# Altium footprint library Robot.PcbLib: 113 footprints (part 3 of 8)
Each footprint in its own frame and in the unit in brackets; x right, y up, seen from the top. Pads: shape width x height; smd on the part's side, far side on the other; paste and mask are expansions set on the pad; w line width, h text height; cw(c..) or ccw(c..) is an arc to the next point about the centre after c.
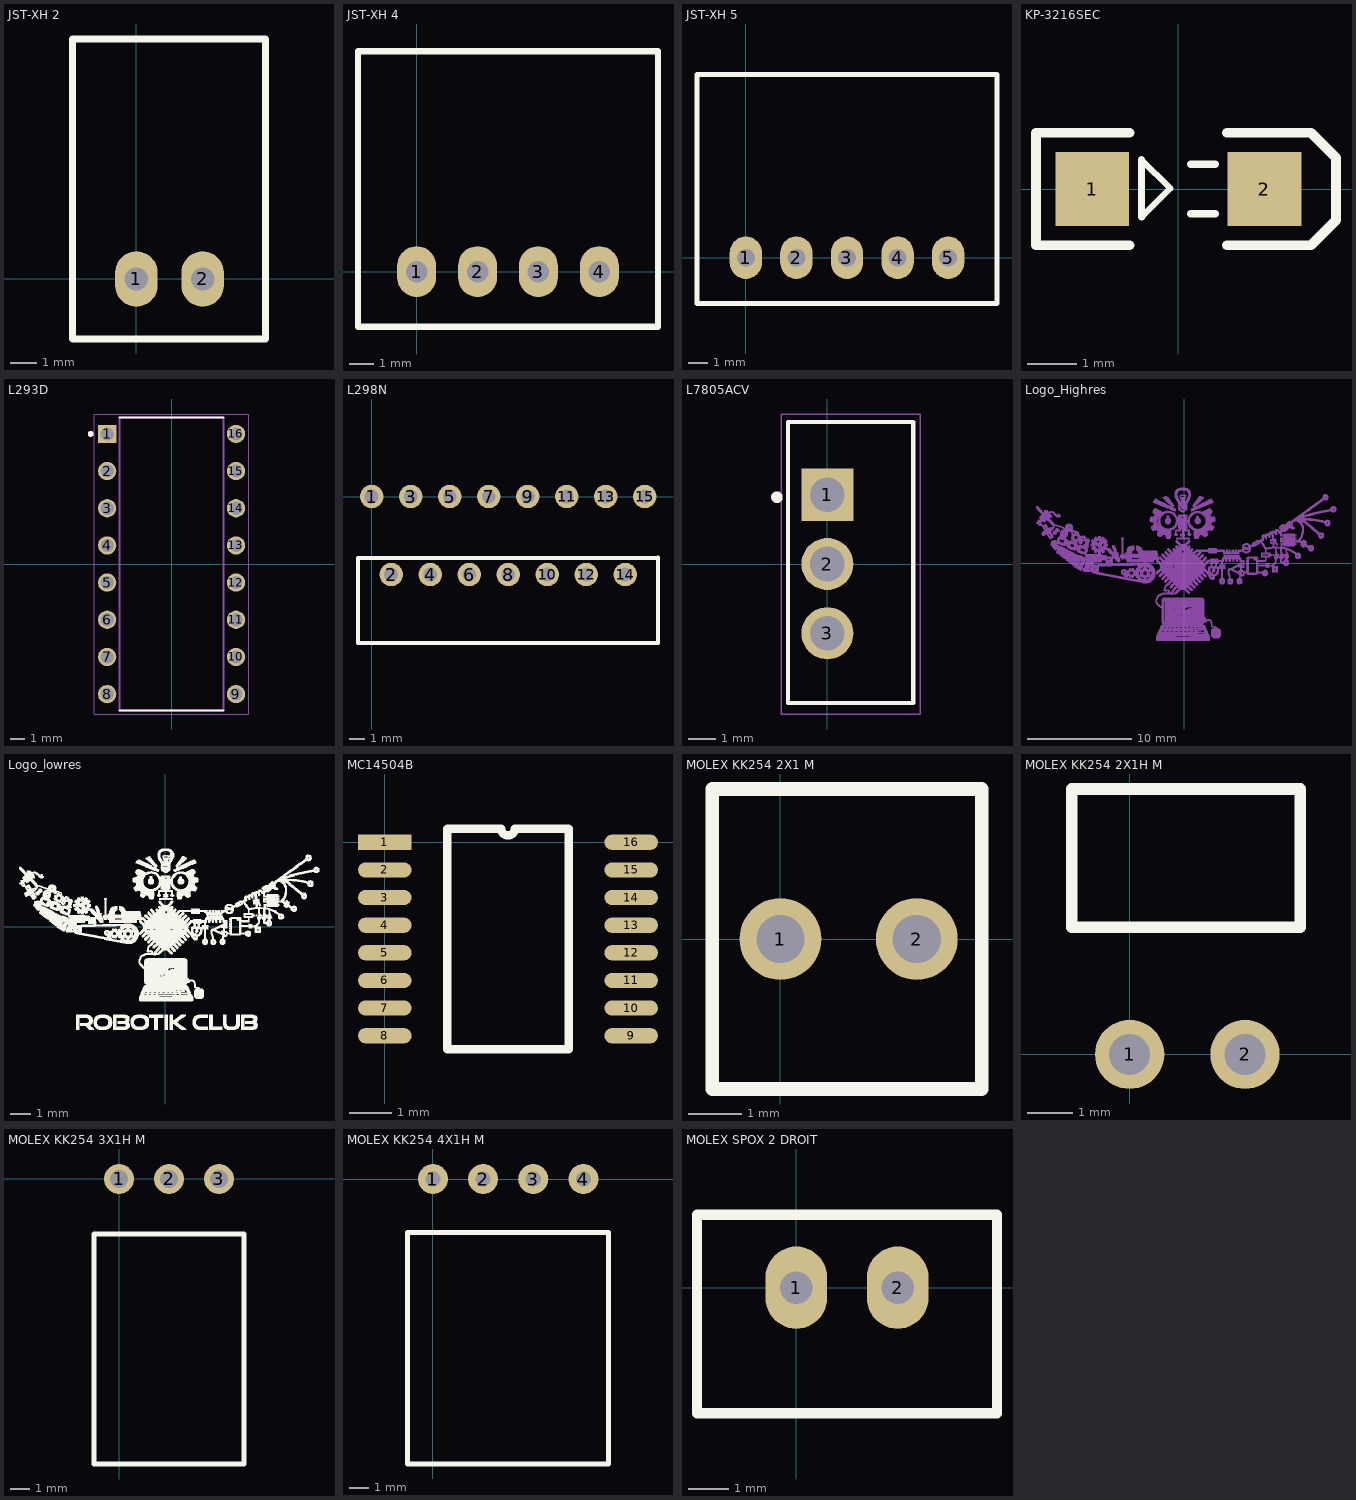
[diagram p2: the footprints below, top view; thin cyan lines are the x and y axes]

## JST-XH 2 [mm]
pads (2):
  oval 1.624x2.132 hole 0.9: 1(0,0) 2(2.54,0)
Top Overlay:
  lines w0.254: -2.45,-2.3 -2.45,9.2 4.95,9.2 4.95,-2.3 -2.45,-2.3

## JST-XH 4 [mm]
pads (4):
  oval 1.624x2.132 hole 0.9: 1(0,0) 2(2.54,0) 3(5.08,0) 4(7.62,0)
Top Overlay:
  lines w0.254: -2.45,-2.3 10.07,-2.3 10.07,9.2 -2.45,9.2 -2.45,-2.3

## JST-XH 5 [mm]
pads (5):
  oval 1.624x2.132 hole 0.9: 1(0,0) 2(2.54,0) 3(5.08,0) 4(7.62,0) 5(10.16,0)
Top Overlay:
  lines w0.254: -2.45,-2.3 -2.45,9.2 12.61,9.2 12.61,-2.3 -2.45,-2.3

## KP-3216SEC [mm]
pads (2):
  rect 1.5x1.5 smd: 1(-1.75,0) 2(1.75,0)
Top Overlay:
  lines w0.127: -0.75,0.598 -0.165,0.013 -0.743,-0.565
  lines w0.15: -0.75,0.598 -0.75,-0.559 -0.743,-0.565 ; 0.25,-0.5 0.75,-0.5 ; 0.25,0.5 0.75,0.5
  lines w0.2: -0.988,-1.143 -2.893,-1.143 -2.893,1.143 -0.988,1.143 ; 0.988,-1.143 2.695,-1.143 3.203,-0.635 3.203,0.635 2.695,1.143 0.988,1.143
3D body "LED 1206 Yel.stp": height 1.1, standoff 0, extent -1.699,-0.787 1.501,0.813

## L293D [mm] "Bipolar Motor Driver - Parallel 16-PowerDIP"
height 5.1
pads (16):
  rect 1.25x1.25 / inner round 1.25 / far side rect 1.25x1.25 hole 0.9: 1(-4.4,8.89)
  round 1.25 hole 0.9: 2(-4.4,6.35) 3(-4.4,3.81) 4(-4.4,1.27) 5(-4.4,-1.27) 6(-4.4,-3.81) 7(-4.4,-6.35) 8(-4.4,-8.89) 9(4.4,-8.89) 10(4.4,-6.35) 11(4.4,-3.81) 12(4.4,-1.27) 13(4.4,1.27) 14(4.4,3.81) 15(4.4,6.35) 16(4.4,8.89)
Top Overlay:
  circle w0.2: c-5.525,8.89 r0.1
  lines w0.127: -3.55,-10 3.55,-10 ; -3.55,10 3.55,10
Mechanical 13:
  circle w0.2: c-5.525,8.89 r0.1
  lines w0.127: -3.55,-10 -3.55,10 3.55,10 3.55,-10 -3.55,-10
Mechanical 15:
  lines w0.05: -5.275,-10.25 -5.275,10.25 5.275,10.25 5.275,-10.25 -5.275,-10.25
3D body "step_temp.STEP": height 5.1, standoff -3.3, extent -4.747,-10 4.493,10

## L298N [mil] "Motor driver, 2 channel"
pads (15):
  round 60 hole 35.43: 1(0,0) 2(50,-200) 3(100,0) 4(150,-200) 5(200,0) 6(250,-200) 7(300,0) 8(350,-200) 9(400,0) 10(450,-200) 11(500,0) 12(550,-200) 13(600,0) 14(650,-200) 15(700,0)
Top Overlay:
  lines w10: -35,-158 -35,-376 734,-376 734,-156 ; -35,-157.48 734,-157.48
3D body "L298_15P.STEP": height 846.46, standoff -140.75, extent -35.62,-379.33 736.03,10.04

## L7805ACV [mm] "Linear Voltage Regulator IC Positive Fixed 1 Output 1.5A TO-220"
pads (3):
  rect 1.91x1.91 / inner round 1.91 / far side rect 1.91x1.91 hole 1.27: 1(0,2.54)
  round 1.91 hole 1.27: 2(0,0) 3(0,-2.54)
Top Overlay:
  circle w0.2: c-1.85,2.45 r0.112
  lines w0.152: -1.45,-5.1 3.15,-5.1 3.15,5.207 -1.45,5.207 -1.45,-5.1
Mechanical 15:
  lines w0.05: -1.7,-5.5 3.4,-5.5 3.4,5.5 -1.7,5.5 -1.7,-5.5
3D body "step_temp.STEP": height 19.68, standoff -9.22, extent -5.1,-2.25 5.1,2.25

## Logo_Highres [mil]
Bottom Overlay:
  drawing of 6573 lines, arcs and shapes, not listed

## Logo_lowres [mil]
Top Overlay:
  drawing of 3369 lines, arcs and shapes, not listed

## MAX 485 [mil] "Transceivers"

## MC14504B [mm]
pads (16):
  rect 1.26x0.36 smd: 1(0,0)
  oval 1.26x0.36 smd: 2(0,-0.65) 3(0,-1.3) 4(0,-1.95) 5(0,-2.6) 6(0,-3.25) 7(0,-3.9) 8(0,-4.55) 9(5.8,-4.55) 10(5.8,-3.9) 11(5.8,-3.25) 12(5.8,-2.6) 13(5.8,-1.95) 14(5.8,-1.3) 15(5.8,-0.65) 16(5.8,0)
Top Overlay:
  lines w0.2: 1.465,-4.875 1.465,0.325 2.738,0.325 ccw(c2.9,0.325) 3.062,0.325 4.335,0.325 4.335,-4.875 1.465,-4.875

## MOLEX KK254 2X1 M [mil]
height 228.35
pads (2):
  round 60 hole 35.43: 1(0,0) 2(100,0)
Top Overlay:
  lines w10: -50,-110 147.64,-110 147.64,110 -50,110 -50,-110
3D body "Molex_KK254_2.stp": height 461.13, standoff -139.65, extent -50,-114.17 150,114.17

## MOLEX KK254 2X1H M [mil] "22-05-7028"
height 228.35
pads (2):
  round 60 hole 35.43: 1(0,0) 2(100,0)
Top Overlay:
  lines w10: -50,110 -50,230 147.64,230 147.64,110 -50,110
3D body "Molex_KK254_2H.stp": height 230.5, standoff -149.11, extent -50.01,-12.09 149.99,568.13

## MOLEX KK254 3X1H M [mil]
height 228.35
pads (3):
  round 60 hole 35.43: 1(0,0) 2(100,0) 3(200,0)
Top Overlay:
  lines w10: -50,-570.87 -50,-110.24 250,-110.24 250,-570.87 -50,-570.87
3D body "molex_22_12_4032.stp": height 230.5, standoff -149.11, extent -50,-569.64 250,10.58

## MOLEX KK254 4X1H M [mil]
height 228.35
pads (4):
  round 60 hole 30: 1(0,0) 2(100,0) 3(200,0) 4(300,0)
Top Overlay:
  lines w10: -50.39,-568.41 -50.39,-106.3 349.61,-106.3 349.61,-568.41 -50.39,-568.41
3D body "molex_22_12_4042.stp": height 230.5, standoff -149.11, extent -50.39,-568.41 349.61,11.81

## MOLEX SPOX 2 DROIT [mil]
pads (2):
  oval 60x80 hole 31.5: 1(0,0) 2(98.43,0)
Top Overlay:
  lines w10: -96.46,-122.05 194.88,-122.05 194.88,70.87 -96.46,70.87 -96.46,-122.05